# Altium footprint library FootPrintLib_0.PcbLib: 266 footprints (part 16 of 17)
Each footprint in its own frame and in the unit in brackets; x right, y up, seen from the top. Pads: shape width x height; smd on the part's side, far side on the other; paste and mask are expansions set on the pad; w line width, h text height; cw(c..) or ccw(c..) is an arc to the next point about the centre after c.
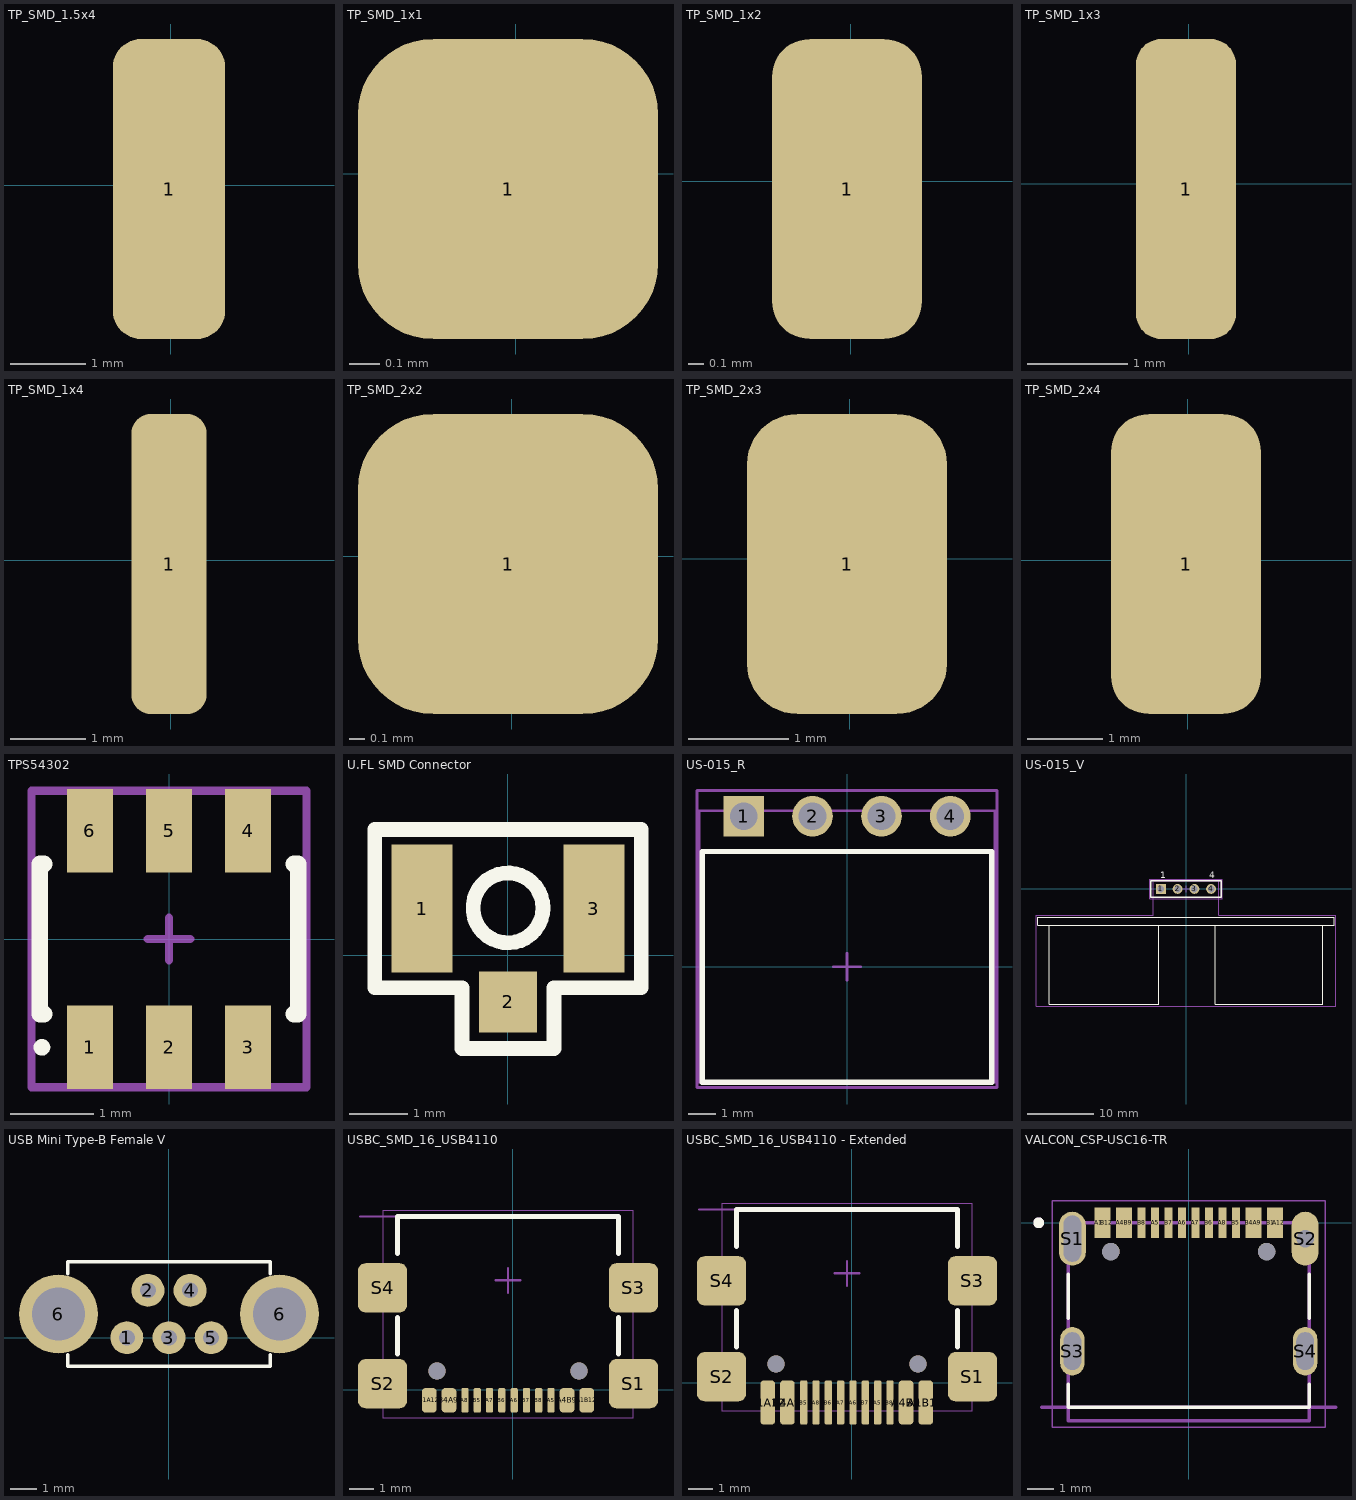
[diagram p15: the footprints below, top view; thin cyan lines are the x and y axes]

## TP_SMD_1.5x4 [mm]
pads (1):
  rrect50% 1.5x4 smd: 1(-0.025,-0.051)

## TP_SMD_1x1 [mm]
pads (1):
  rrect50% 1x1 smd: 1(-0.025,-0.051)

## TP_SMD_1x2 [mm]
pads (1):
  rrect50% 1x2 smd: 1(-0.025,-0.051)

## TP_SMD_1x3 [mm]
pads (1):
  rrect50% 1x3 smd: 1(-0.025,-0.051)

## TP_SMD_1x4 [mm]
pads (1):
  rrect50% 1x4 smd: 1(-0.025,-0.051)

## TP_SMD_2x2 [mm]
pads (1):
  rrect50% 2x2 smd: 1(-0.025,-0.051)

## TP_SMD_2x3 [mm]
pads (1):
  rrect50% 2x3 smd: 1(-0.025,-0.051)

## TP_SMD_2x4 [mm]
pads (1):
  rrect50% 2x4 smd: 1(-0.025,-0.051)

## TPS54302 [mm] "SOT-457/SC-74; 6 Leads; Body 3 x 3 mm, inc. leads (LxW max)"
height 1.45
pads (6):
  rect 0.55x1 smd: 1(-0.95,-1.3) 2(0,-1.3) 3(0.95,-1.3) 4(0.95,1.3) 5(0,1.3) 6(-0.95,1.3)
Top Overlay:
  circle w0.1: c-1.525,-1.3 r0.05
  lines w0.2: -1.5,-0.9 -1.55,-0.9 -1.55,0.9 -1.5,0.9 ; 1.5,-0.9 1.55,-0.9 1.55,0.9 1.5,0.9
Mechanical 15:
  lines w0.1: -0.254,0 0.254,0 ; 0,-0.254 0,0.254 ; -1.651,-1.778 1.651,-1.778 1.651,1.778 -1.651,1.778 -1.651,-1.778
3D body "User Library-SOT23-6.step": height 1.45, standoff 0, extent -1.448,-1.4 1.452,1.4

## U.FL SMD Connector [mm]
pads (3):
  rect 1.05x2.2 smd: 1(-1.475,0.8) 3(1.475,0.8)
  rect 1x1.05 smd: 2(0.002,-0.8)
Top Overlay:
  circle w0.254: c0,0.813 r0.6
  lines w0.254: -2.286,-0.559 -2.286,2.159 2.286,2.159 2.286,-0.559 0.787,-0.559 0.787,-1.6 -0.787,-1.6 -0.787,-0.559 -2.286,-0.559
3D body "SW3dPS-U.FL-R-SMT-1.STEP": height 1.25, standoff -0.01, extent -1.449,-0.915 1.551,2.185

## US-015_R [mm]
height 2.5
pads (4):
  rect 1.5x1.5 hole 1.02: 1(-3.81,5.55)
  round 1.5 hole 1.02: 2(-1.27,5.55) 3(1.27,5.55) 4(3.81,5.55)
Top Overlay:
  lines w0.2: -5.33,-4.25 -5.33,4.25 5.33,4.25 5.33,-4.25 -5.33,-4.25
Mechanical 11:
  lines w0.1: -5.33,-4.25 5.33,-4.25 5.33,4.25 -5.33,4.25 -5.33,-4.25
Mechanical 13:
  lines w0.1: -5.455,-4.25 -5.455,5.75 5.455,5.75 5.455,-4.25 -5.455,-4.25
Mechanical 15:
  lines w0.1: -0.5,0 0.5,0 ; 0,-0.5 0,0.5 ; -5.53,-4.45 -5.53,6.5 5.53,6.5 5.53,-4.45 -5.53,-4.45
3D body "613004143121.stp": height 2.55, standoff -3.04, extent -5.33,-4.25 5.33,5.75

## US-015_V [mm]
height 8.5
pads (4):
  rect 1.5x1.5 hole 1.02: 1(-3.81,0)
  round 1.5 hole 1.02: 2(-1.27,0) 3(1.27,0) 4(3.81,0)
Top Overlay:
  lines w0.127: -21.5,-5.47 -4.166,-5.47 -4.166,-17.501 -20.726,-17.501 -20.726,-5.47 -22.5,-5.47 -22.5,-4.27 22.5,-4.27 22.5,-5.47 20.676,-5.47 ; -5.5,-5.47 4.42,-5.47 ; 4.42,-5.47 4.42,-17.501 20.752,-17.501 20.752,-5.47 4.42,-5.47
  lines w0.2: -5.33,-1.25 5.33,-1.25 5.33,1.25 -5.33,1.25 -5.33,-1.25
  text "1" at -3.9,1.6 h1
  text "4" at 3.5,1.6 h1
Mechanical 11:
  lines w0.1: -5.33,-1.25 5.33,-1.25 5.33,1.25 -5.33,1.25 -5.33,-1.25
Mechanical 13:
  lines w0.1: -5.455,-1.25 -5.455,1.25 5.455,1.25 5.455,-1.25 -5.455,-1.25
Mechanical 15:
  lines w0.05: -22.75,-17.78 22.75,-17.78 22.75,-4 5,-4 5,1.25 -5,1.25 -5,-4 -22.75,-4 -22.75,-17.78
  lines w0.1: -0.5,0 0.5,0 ; 0,-0.5 0,0.5 ; -5.53,-1.45 -5.53,1.45 5.53,1.45 5.53,-1.45 -5.53,-1.45
3D body "hc-sr04.step": height 21, standoff -4.83, extent -22.398,-17.489 22.602,0.311

## USB Mini Type-B Female V [mm] "USB Mini Type-B Female Vertical, Body 7.8X4mm"
height 9.4
pads (7):
  round 1.25 hole 0.6: 1(-1.6,0) 2(-0.8,1.8) 3(0,0) 4(0.8,1.8) 5(1.6,0)
  round 3 hole 2: 6(-4.2,0.9) 6(4.2,0.9)
Top Overlay:
  lines w0.127: -3.85,-0.65 -3.85,-1.08 3.85,-1.08 3.85,-0.65 ; -3.85,2.43 -3.85,2.88 3.85,2.88 3.85,2.43
3D body "651005136421.stp": height 9.21, standoff -2.79, extent -5.098,-1.05 5.098,2.85

## USBC_SMD_16_USB4110 [mm] "CONN, USB, Type C, USB4110"
height 3.26
pads (18):
  rrect50% 0.6x1 smd mask+0.075: A1B12(2.997,-0.431) A4B9(2.197,-0.431) B1A12(-3.403,-0.431) B4A9(-2.603,-0.431)
  rrect50% 0.3x1 smd mask+0.075: A5(1.547,-0.431) A6(0.047,-0.431) A7(-0.953,-0.431) A8(-1.953,-0.431) B5(-1.453,-0.431) B6(-0.453,-0.431) B7(0.547,-0.431) B8(1.047,-0.431)
  rrect30% 2x2 smd: S1(4.897,0.244) S2(-5.303,0.244) S3(4.897,4.144) S4(-5.303,4.144)
  round 0.7 hole 0.7 unplated: ""(-3.093,0.764) ""(2.687,0.764)
Top Overlay:
  lines w0.2: -4.703,1.444 -4.703,2.944 ; -4.703,5.544 -4.703,7.044 4.297,7.044 4.297,5.544 ; 4.297,1.444 4.297,2.944
Mechanical 13:
  lines w0.1: -6.203,7.044 -4.203,7.044
  text "PCB EDGE" at -6.203,7.444 h0.8
Mechanical 15:
  lines w0.05: -5.303,-1.136 -5.303,7.294 4.897,7.294 4.897,-1.136 -5.303,-1.136
  lines w0.1: -0.703,4.444 0.297,4.444 ; -0.203,3.944 -0.203,4.944
3D body "USB4110-GF-A.stp": height 3.23, standoff -0.72, extent -5.853,-0.636 5.447,7.041

## USBC_SMD_16_USB4110 - Extended [mm] "CONN, USB, Type C, USB4110"
height 3.26
pads (18):
  rrect50% 0.6x1.8 smd mask+0.075: A1B12(2.997,-0.805) A4B9(2.197,-0.805) B1A12(-3.428,-0.805) B4A9(-2.628,-0.805)
  rrect50% 0.3x1.8 smd mask+0.075: A5(1.043,-0.805) A6(0.041,-0.805) A7(-0.46,-0.805) A8(-1.461,-0.805) B5(-1.962,-0.805) B6(-0.961,-0.805) B7(0.542,-0.805) B8(1.544,-0.805)
  rrect30% 2x2 smd: S1(4.897,0.244) S2(-5.303,0.244) S3(4.897,4.144) S4(-5.303,4.144)
  round 0.7 hole 0.7 unplated: ""(-3.093,0.764) ""(2.687,0.764)
Top Overlay:
  lines w0.2: -4.703,1.444 -4.703,2.944 ; -4.703,5.544 -4.703,7.044 4.297,7.044 4.297,5.544 ; 4.297,1.444 4.297,2.944
Mechanical 13:
  lines w0.1: -6.203,7.044 -4.203,7.044
  text "PCB EDGE" at -6.203,7.444 h0.8
Mechanical 15:
  lines w0.05: -5.303,-1.136 4.897,-1.136 4.897,7.294 -5.303,7.294 -5.303,-1.136
  lines w0.1: -0.703,4.444 0.297,4.444 ; -0.203,3.944 -0.203,4.944
3D body "USB4110-GF-A.stp": height 3.23, standoff -0.72, extent -5.853,-0.636 5.447,7.041

## VALCON_CSP-USC16-TR [mm]
height 3.26
pads (22):
  rect 0.3x1.14 smd: A1(-3.35,0) A4(-2.55,0) A5(-1.25,0) A6(-0.25,0) A7(0.25,0) A8(1.25,0) A9(2.55,0) A12(3.35,0) B1(3.05,0) B4(2.25,0) B5(1.75,0) B6(0.75,0) B7(-0.75,0) B8(-1.75,0) B9(-2.25,0) B12(-3.05,0)
  oval 1x2 hole 0.65 slot 1.72 at 90 deg: S1(-4.325,-0.59)
  oval 1x2 hole 0.65: S2(4.325,-0.59)
  oval 0.9x1.8 hole 0.65 slot 1.4 at 90 deg: S3(-4.325,-4.77) S4(4.325,-4.77)
  round 0.65 hole 0.65 unplated: ""(-2.89,-1.07) ""(2.89,-1.07)
Top Overlay:
  circle w0.2: c-5.575,0 r0.1
  lines w0.127: -4.47,-6 -4.47,-6.86 4.47,-6.86 4.47,-6 ; -4.47,-3.55 -4.47,-1.91 ; 4.47,-3.55 4.47,-1.91
Mechanical 1:
  lines w0: 4,-0.093 cw(c4.335,-0.075) 4.317,0.26 cw(c4.335,-0.055) 4.65,-0.038 ; 4,-0.09 4,-1.14 ccw(c4.31,-1.13) 4.321,-1.44 ; 4.318,-1.44 ccw(c4.335,-1.125) 4.65,-1.142 ; 4.65,-1.14 4.65,-0.04
Mechanical 13:
  circle w0.2: c-5.575,0 r0.1
  lines w0.127: -5.47,-6.86 5.47,-6.86 ; -4.47,-7.35 -4.47,0 4.47,0 4.47,-7.35 -4.47,-7.35
  text "PCB Edge" at -2.07,-6.6 h0.7
Mechanical 15:
  lines w0.05: -5.075,-7.6 -5.075,0.82 5.075,0.82 5.075,-7.6 -5.075,-7.6
3D body "step_temp.STEP": height 3.26, standoff -1, extent -4.47,-6.28 4.47,1.47